# Altium footprint library SamacSys.PcbLib: 70 footprints (part 1 of 5)
Each footprint in its own frame and in the unit in brackets; x right, y up, seen from the top. Pads: shape width x height; smd on the part's side, far side on the other; paste and mask are expansions set on the pad; w line width, h text height; cw(c..) or ccw(c..) is an arc to the next point about the centre after c.
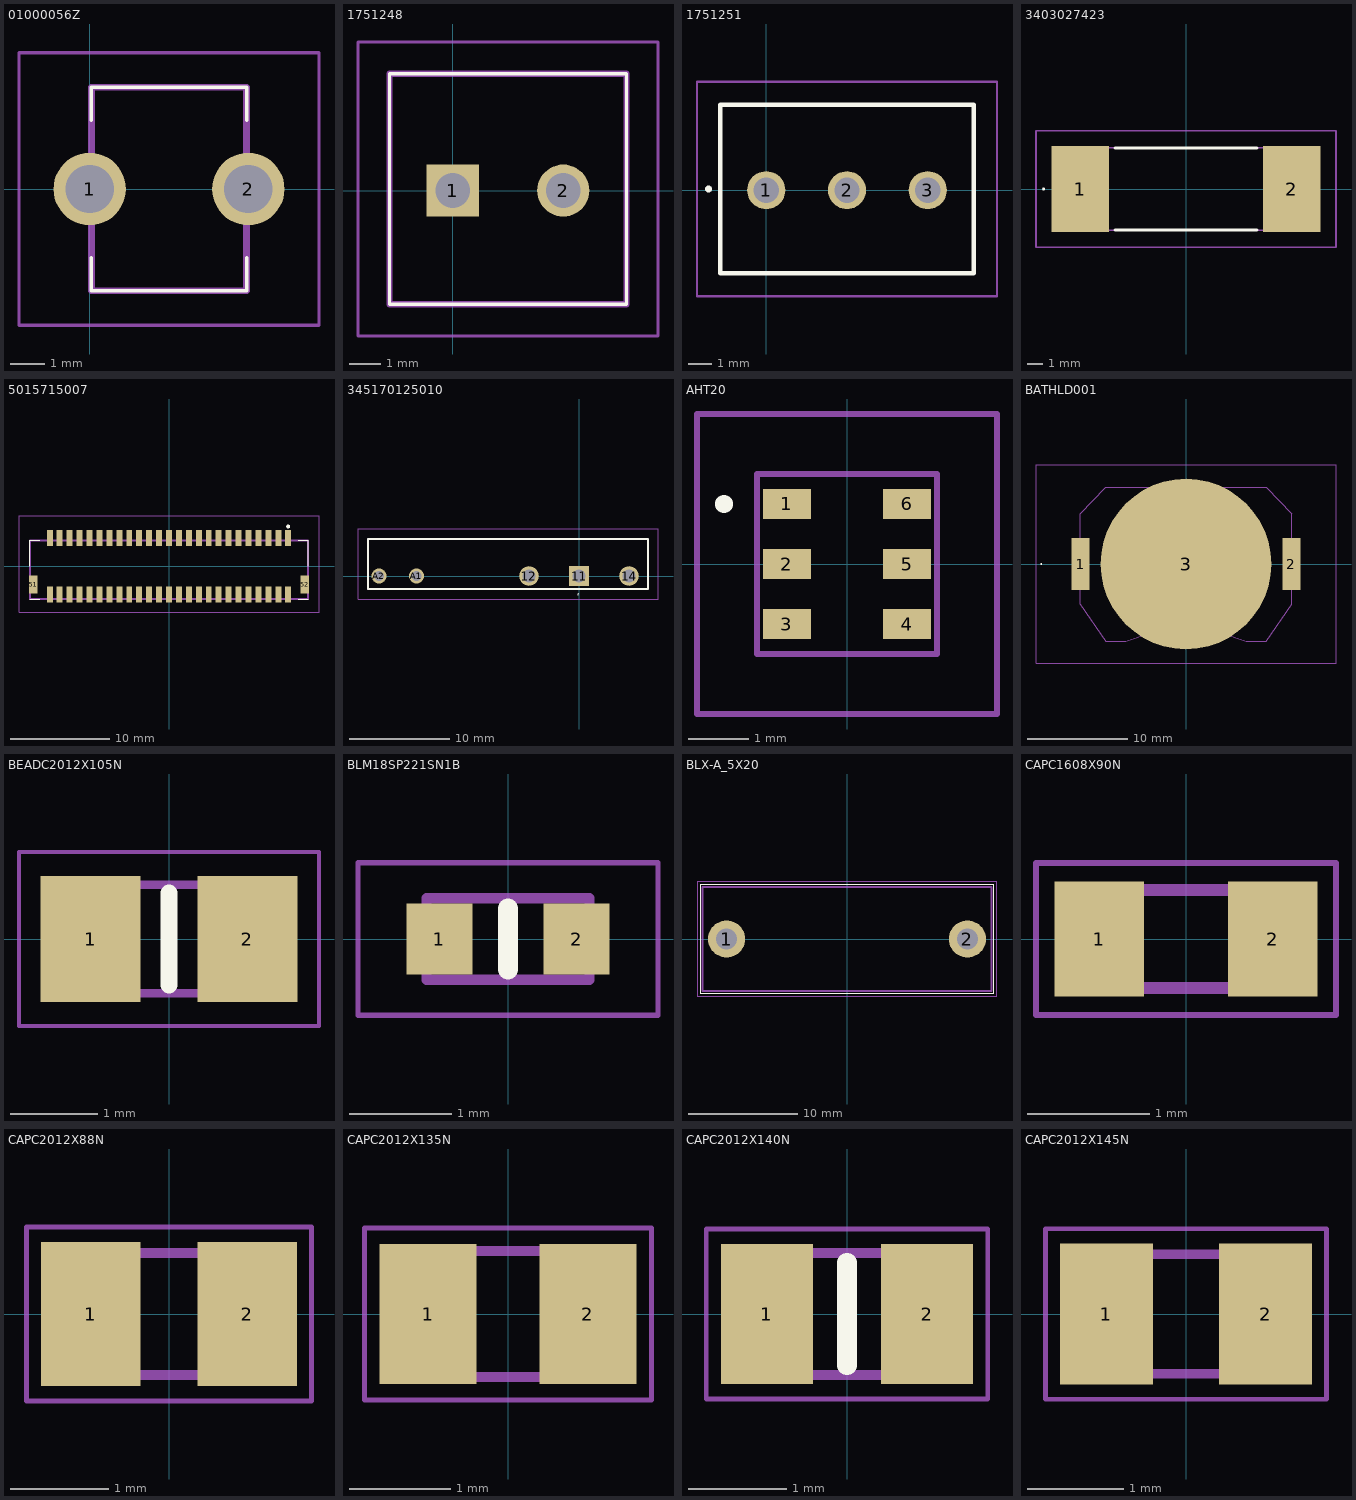
[diagram p0: the footprints below, top view; thin cyan lines are the x and y axes]

## 01000056Z [mm]
pads (2):
  round 2.1 hole 1.4: 1(0,0) 2(4.6,0)
Top Overlay:
  lines w0.1: 0.05,-2 0.05,-2.95 4.55,-2.95 4.55,-2 ; 0.05,2 0.05,2.95 4.55,2.95 4.55,2
Mechanical 13:
  lines w0.2: 0.05,-2.95 4.55,-2.95 4.55,2.95 0.05,2.95 0.05,-2.95
Mechanical 15:
  lines w0.1: -2.05,-3.95 6.65,-3.95 6.65,3.95 -2.05,3.95 -2.05,-3.95
3D body "01000056Z.stp": height 0.23, standoff 0.23, extent 2.35,0 2.35,0

## 1751248 [mm]
pads (2):
  rect 1.65x1.65 hole 1.1: 1(0,0)
  round 1.65 hole 1.1: 2(3.5,0)
Top Overlay:
  lines w0.1: -2,-3.6 -2,3.7 5.5,3.7 5.5,-3.6 -2,-3.6
Mechanical 13:
  lines w0.2: -2,-3.6 -2,3.7 5.5,3.7 5.5,-3.6 -2,-3.6
Mechanical 15:
  lines w0.1: -3,-4.6 -3,4.7 6.5,4.7 6.5,-4.6 -3,-4.6
3D body "1751248.stp": height 8.5, standoff -3.5, extent -2,-3.6 5.5,3.7

## 1751251 [mm]
pads (3):
  round 1.65 hole 1.1: 1(0,0) 2(3.5,0) 3(7,0)
Top Overlay:
  lines w0.2: -2.5,0 cw(c-2.5,0.05) -2.5,0.1 cw(c-2.5,0.05) -2.5,0 ; -2,-3.6 -2,3.7 9,3.7 9,-3.6 -2,-3.6
Mechanical 13:
  lines w0.1: -2,-3.6 -2,3.7 9,3.7 9,-3.6 -2,-3.6
Mechanical 15:
  lines w0.1: -3,-4.6 -3,4.7 10,4.7 10,-4.6 -3,-4.6
3D body "1751251.stp": height 8.5, standoff -3.5, extent -2,-3.6 9,3.7

## 3403027423 [mm]
pads (2):
  rect 3.75x5.6 smd: 1(-6.875,0) 2(6.875,0)
Top Overlay:
  lines w0.1: -9.3,0 ccw(c-9.25,0) -9.2,0 ccw(c-9.25,0) -9.3,0
  lines w0.2: -4.6,-2.675 4.6,-2.675 ; -4.6,2.675 4.6,2.675
Mechanical 13:
  lines w0.1: -7.7,-2.675 -7.7,2.675 7.7,2.675 7.7,-2.675 -7.7,-2.675
Mechanical 15:
  lines w0.1: -9.75,-3.8 -9.75,3.8 9.75,3.8 9.75,-3.8 -9.75,-3.8
3D body "3403.0274.23.stp": height 5.36, standoff 0, extent -8.1,-2.675 8.1,2.675

## 5015715007 [mm]
pads (52):
  rect 0.6x1.6 smd: 1(12,2.85) 2(12,-2.85) 3(11,2.85) 4(11,-2.85) 5(10,2.85) 6(10,-2.85) 7(9,2.85) 8(9,-2.85) 9(8,2.85) 10(8,-2.85) 11(7,2.85) 12(7,-2.85) 13(6,2.85) 14(6,-2.85) 15(5,2.85) 16(5,-2.85) 17(4,2.85) 18(4,-2.85) 19(3,2.85) 20(3,-2.85) 21(2,2.85) 22(2,-2.85) 23(1,2.85) 24(1,-2.85) 25(0,2.85) 26(0,-2.85) 27(-1,2.85) 28(-1,-2.85) 29(-2,2.85) 30(-2,-2.85) 31(-3,2.85) 32(-3,-2.85) 33(-4,2.85) 34(-4,-2.85) 35(-5,2.85) 36(-5,-2.85) 37(-6,2.85) 38(-6,-2.85) 39(-7,2.85) 40(-7,-2.85) 41(-8,2.85) 42(-8,-2.85) 43(-9,2.85) 44(-9,-2.85) 45(-10,2.85) 46(-10,-2.85) 47(-11,2.85) 48(-11,-2.85) 49(-12,2.85) 50(-12,-2.85)
  rect 0.85x1.8 smd: 51(-13.675,-1.85) 52(13.675,-1.85)
Top Overlay:
  lines w0.1: -14,-3.3 -13,-3.3 ; -14,0 -14,2.6 -13.675,2.6 -13,2.6 ; 13,-3.3 14,-3.3 ; 13,2.6 13.675,2.6 14,2.6 14,0
  lines w0.2: 11.9,4 ccw(c12,4) 12.1,4 ccw(c12,4) 11.9,4
Mechanical 13:
  lines w0.2: -14,-3.3 -14,2.6 14,2.6 14,-3.3 -14,-3.3
Mechanical 15:
  lines w0.1: -15.1,-4.65 -15.1,5.1 15.1,5.1 15.1,-4.65 -15.1,-4.65
3D body "501571-5007.stp": height 8.25, standoff 0, extent -14,-2.95 14,3.55

## 345170125010 [mm]
pads (5):
  rect 1.95x1.95 hole 1.3: 11(0,0)
  round 1.95 hole 1.3: 12(-5,0) 14(5,0)
  round 1.5 hole 1: A1(-16.25,0) A2(-20,0)
Top Overlay:
  lines w0.1: -0.1,-1.9 cw(c-0.1,-1.85) -0.1,-1.8 cw(c-0.1,-1.85) -0.1,-1.9
  lines w0.2: -21.1,-1.3 -21.1,3.7 6.9,3.7 6.9,-1.3 -21.1,-1.3
Mechanical 13:
  lines w0.1: -21.1,-1.3 -21.1,3.7 6.9,3.7 6.9,-1.3 -21.1,-1.3
Mechanical 15:
  lines w0.1: -22.1,-2.3 -22.1,4.7 7.9,4.7 7.9,-2.3 -22.1,-2.3
3D body "34.51.7.012.5010.stp": height 15.1, standoff -5, extent -21.1,-1.3 6.9,3.7

## AHT20 [mm]
pads (6):
  rect 0.8x0.5 smd: 1(-1,1) 2(-1,0) 3(-1,-1) 4(1,-1) 5(1,0) 6(1,1)
Top Overlay:
  lines w0.2: -2.1,1 ccw(c-2.05,1) -2,1 ; -2.1,1 cw(c-2.05,1) -2,1 ; -2.1,1 ccw(c-2.05,1) -2,1
Mechanical 13:
  lines w0.1: -1.5,-1.5 -1.5,1.5 1.5,1.5 1.5,-1.5 -1.5,-1.5
Mechanical 15:
  lines w0.1: -2.5,-2.5 -2.5,2.5 2.5,2.5 2.5,-2.5 -2.5,-2.5
3D body "AHT20.stp": height 1.2, standoff 0, extent -1.5,-1.5 1.5,1.5

## BATHLD001 [mm]
pads (3):
  rect 1.8x5.2 smd: 1(-10.5,0) 2(10.5,0)
  round 17 smd: 3(0,0)
Top Overlay:
  lines w0.1: -14.5,0 ccw(c-14.45,0) -14.4,0 ccw(c-14.45,0) -14.5,0
Mechanical 13:
  lines w0.1: -10.55,-4 -8,-7.7 -6,-7.7 -1,-6 1,-6 6,-7.7 8,-7.7 10.55,-4 10.55,5 8,7.65 0,7.65 -8,7.65 -10.55,5 -10.55,-4
Mechanical 15:
  lines w0.1: -14.95,-9.9 14.95,-9.9 14.95,9.9 -14.95,9.9 -14.95,-9.9
3D body "BAT-HLD-001.stp": height 4.32, standoff 0, extent -11.43,-7.751 11.43,7.743

## BEADC2012X105N [mm]
pads (2):
  rect 1.15x1.45 smd: 1(-0.9,0) 2(0.9,0)
Top Overlay:
  lines w0.2: 0,-0.525 0,0.525
Mechanical 13:
  lines w0.1: -1,-0.625 -1,0.625 1,0.625 1,-0.625 -1,-0.625
Mechanical 15:
  lines w0.05: -1.725,-1 -1.725,1 1.725,1 1.725,-1 -1.725,-1
3D body "BLM21PG221SN1D.stp": height 1.05, standoff 0, extent -1,-0.625 1,0.625

## BLM18SP221SN1B [mm]
pads (2):
  rect 0.65x0.7 smd: 1(-0.675,0) 2(0.675,0)
Top Overlay:
  lines w0.2: 0,-0.3 0,0.3
Mechanical 13:
  lines w0.1: -0.8,-0.4 -0.8,0.4 0.8,0.4 0.8,-0.4 -0.8,-0.4
Mechanical 15:
  lines w0.05: -1.475,-0.75 -1.475,0.75 1.475,0.75 1.475,-0.75 -1.475,-0.75
3D body "BLM18PG221SN1D.stp": height 0.8, standoff 0, extent -0.8,-0.4 0.8,0.4

## BLX-A_5X20 [mm] "Portafusible 5x20 BLX-A, pines a 22 mm"
pads (2):
  round 3.4 hole 1.9: 1(-11,0) 2(11,0)
Top Overlay:
  lines w0.1: -13.4,-4.95 13.4,-4.95 13.4,4.95 -13.4,4.95 -13.4,-4.95
Mechanical 13:
  lines w0.2: -13.2,-4.75 13.2,-4.75 13.2,4.75 -13.2,4.75 -13.2,-4.75
Mechanical 15:
  lines w0.1: -13.7,-5.25 13.7,-5.25 13.7,5.25 -13.7,5.25 -13.7,-5.25

## CAPC1608X90N [mm]
pads (2):
  rect 0.73x0.94 smd: 1(-0.71,0) 2(0.71,0)
Mechanical 13:
  lines w0.1: -0.8,-0.4 -0.8,0.4 0.8,0.4 0.8,-0.4 -0.8,-0.4
Mechanical 15:
  lines w0.05: -1.225,-0.62 -1.225,0.62 1.225,0.62 1.225,-0.62 -1.225,-0.62
3D body "CL10C102JB8NNNC.stp": height 0.9, standoff 0, extent -0.8,-0.4 0.8,0.4

## CAPC2012X88N [mm]
pads (2):
  rect 1.02x1.47 smd: 1(-0.8,0) 2(0.8,0)
Mechanical 13:
  lines w0.1: -1,-0.625 -1,0.625 1,0.625 1,-0.625 -1,-0.625
Mechanical 15:
  lines w0.05: -1.46,-0.89 -1.46,0.89 1.46,0.89 1.46,-0.89 -1.46,-0.89
3D body "C0805C102J5GAC-TU.stp": height 0.88, standoff 0, extent -1.1,-0.72 1.1,0.73

## CAPC2012X135N [mm]
pads (2):
  rect 0.96x1.39 smd: 1(-0.79,0) 2(0.79,0)
Mechanical 13:
  lines w0.1: -1,-0.625 1,-0.625 1,0.625 -1,0.625 -1,-0.625
Mechanical 15:
  lines w0.05: -1.42,-0.85 1.42,-0.85 1.42,0.85 -1.42,0.85 -1.42,-0.85
3D body "MCAST21GSB7105MTNB25.stp": height 1.35, standoff 0, extent -1,-0.625 1,0.625

## CAPC2012X140N [mm]
pads (2):
  rect 0.94x1.43 smd: 1(-0.82,0) 2(0.82,0)
Top Overlay:
  lines w0.2: 0,-0.525 0,0.525
Mechanical 13:
  lines w0.1: -1,-0.625 -1,0.625 1,0.625 1,-0.625 -1,-0.625
Mechanical 15:
  lines w0.05: -1.44,-0.87 -1.44,0.87 1.44,0.87 1.44,-0.87 -1.44,-0.87
3D body "CL21A226MAQNNNE.stp": height 1.4, standoff 0, extent -1,-0.625 1,0.625

## CAPC2012X145N [mm]
pads (2):
  rect 0.97x1.47 smd: 1(-0.83,0) 2(0.83,0)
Mechanical 13:
  lines w0.1: -1,-0.625 -1,0.625 1,0.625 1,-0.625 -1,-0.625
Mechanical 15:
  lines w0.05: -1.465,-0.89 -1.465,0.89 1.465,0.89 1.465,-0.89 -1.465,-0.89
3D body "CL21A106KAYNNNE.stp": height 1.45, standoff 0, extent -1,-0.625 1,0.625